# Altium schematic symbol library SI2302DS.SchLib: 1 symbol
Pins are listed as number, name and electrical type; pins without a type are passive.

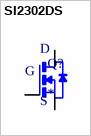
[diagram p0: symbol SI2302DS]

## SI2302DS
designator Q?
N-Channel 20V 2.5A (Tc) 830mW (Tc) Surface Mount TO-236AB (SOT23); MF: NXP Semiconductors; MP: SI2302DS; SnapEDA_Link: https://www.snapeda.com/parts/SI2302DS/NXP+Semiconductors/view-part/?ref=snap; Package: SC-59 NXP Semiconductors; Value: *; Check_prices: https://www.snapeda.com/parts/SI2302DS/NXP+Semiconductors/view-part/?ref=eda
footprint SOT23-3/TO-236AB
pins: 1 G, 2 S, 3 D